# Altium footprint library TPS54538RQFR.PcbLib: 1 footprints
Each footprint in its own frame and in the unit in brackets; x right, y up, seen from the top. Pads: shape width x height; smd on the part's side, far side on the other; paste and mask are expansions set on the pad; w line width, h text height; cw(c..) or ccw(c..) is an arc to the next point about the centre after c.
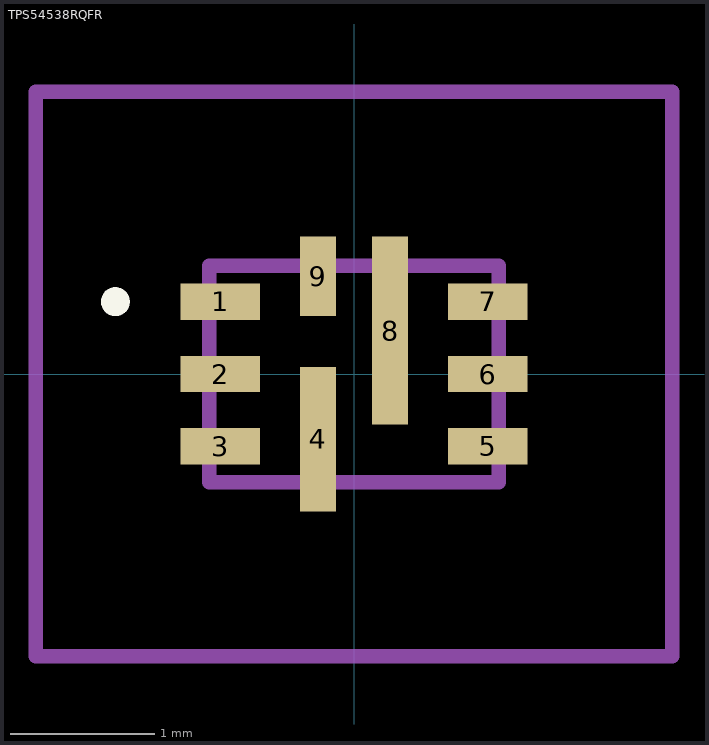
[diagram p0: the footprint, top view; thin cyan lines are the x and y axes]

## TPS54538RQFR [mm]
pads (9):
  rect 0.55x0.25 smd: 1(-0.925,0.5) 2(-0.925,0) 3(-0.925,-0.5) 5(0.925,-0.5) 6(0.925,0) 7(0.925,0.5)
  rect 0.25x1 smd: 4(-0.25,-0.45)
  rect 0.25x1.3 smd: 8(0.25,0.3)
  rect 0.25x0.55 smd: 9(-0.25,0.675)
Top Overlay:
  lines w0.1: -1.7,0.5 cw(c-1.65,0.5) -1.6,0.5 ; -1.7,0.5 -1.7,0.5 ; -1.7,0.5 ccw(c-1.65,0.5) -1.6,0.5 ; -1.6,0.5 -1.6,0.5
Mechanical 15:
  lines w0.1: -1,-0.75 1,-0.75 1,0.75 -1,0.75 -1,-0.75
Mechanical 20:
  lines w0.1: -2.2,-1.95 2.2,-1.95 2.2,1.95 -2.2,1.95 -2.2,-1.95